# Altium footprint library inductor_smd.PcbLib: 1 footprints
Each footprint in its own frame and in the unit in brackets; x right, y up, seen from the top. Pads: shape width x height; smd on the part's side, far side on the other; paste and mask are expansions set on the pad; w line width, h text height; cw(c..) or ccw(c..) is an arc to the next point about the centre after c.
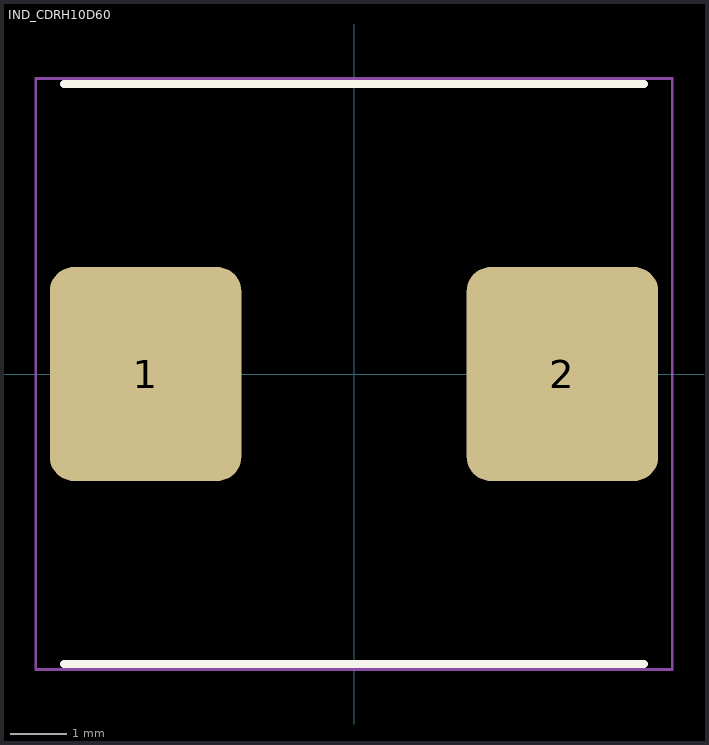
[diagram p0: the footprint, top view; thin cyan lines are the x and y axes]

## IND_CDRH10D60 [mm] "Sumida CDRH10D60B/T150 reference land 3.4x3.8, gap 4.0; body 10.3x10.0x6.35 max"
height 6.35
pads (2):
  rrect25% 3.4x3.8 smd: 1(-3.7,0) 2(3.7,0)
Top Overlay:
  lines w0.15: -5.15,-5.15 5.15,-5.15 ; -5.15,5.15 5.15,5.15
  text ".Designator" at 0,2.5 h1
Top Courtyard:
  lines w0.05: -5.65,-5.25 -5.65,5.25 5.65,5.25 5.65,-5.25 -5.65,-5.25
3D body: height 6.35, standoff 0, extent -5.15,-5 5.15,5